# Altium footprint library LimeMicroAltiumLib.PcbLib: 876 footprints (part 21 of 57)
Each footprint in its own frame and in the unit in brackets; x right, y up, seen from the top. Pads: shape width x height; smd on the part's side, far side on the other; paste and mask are expansions set on the pad; w line width, h text height; cw(c..) or ccw(c..) is an arc to the next point about the centre after c.
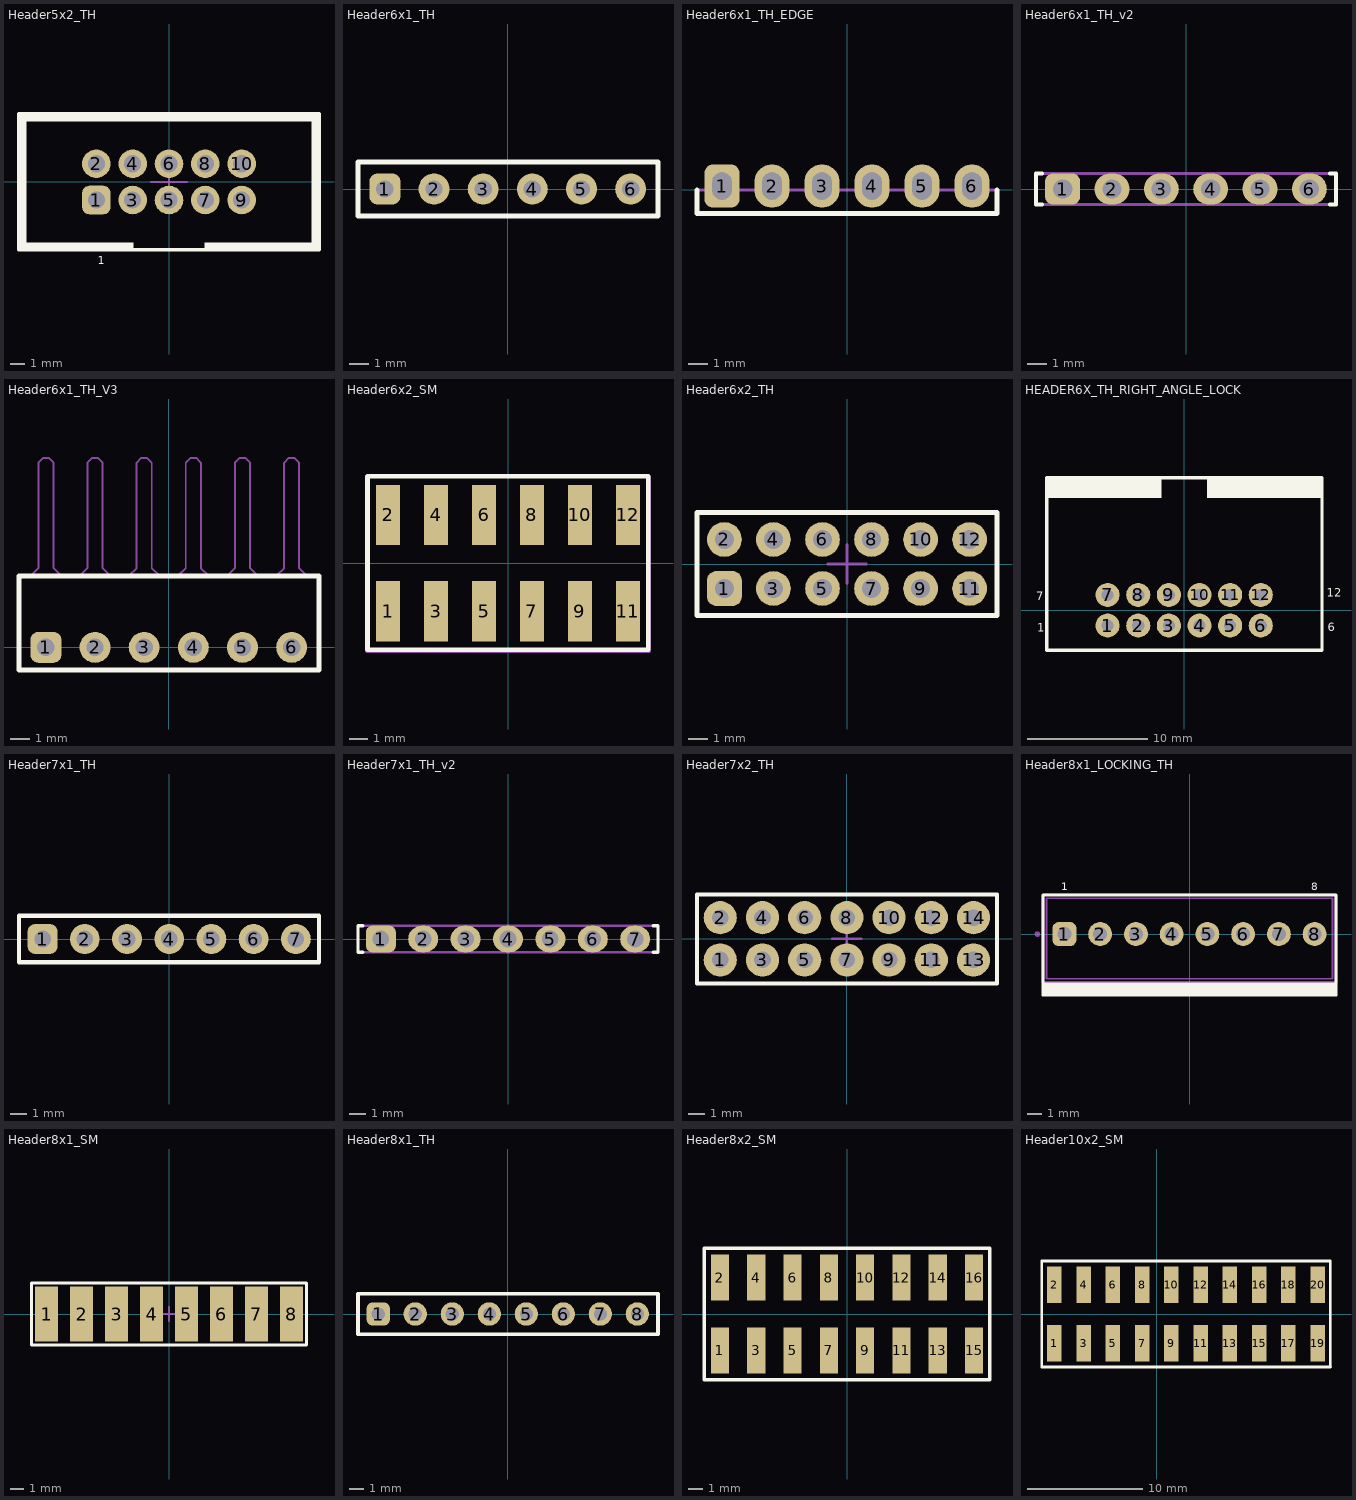
[diagram p20: the footprints below, top view; thin cyan lines are the x and y axes]

## Header5x2_TH [mm]
pads (10):
  rrect50% 2x2 hole 1.2: 1(-5.086,-1.271)
  round 2 hole 1.2: 2(-5.086,1.271) 3(-2.543,-1.271) 4(-2.543,1.271) 5(0,-1.271) 6(0,1.271) 7(2.543,-1.271) 8(2.543,1.271) 9(5.086,-1.271) 10(5.086,1.271)
Top Overlay:
  region: -10.5,-4.75 -10.5,4.75 -10,4.75 -10,-4.75
  region: -10.25,-4.25 -2.5,-4.25 -2.5,-4.75 -10.25,-4.75
  region: 10.25,-4.25 2.5,-4.25 2.5,-4.75 10.25,-4.75
  region: 10.5,-4.75 10.5,4.75 10,4.75 10,-4.75
  region: 10.5,4.25 -10.5,4.25 -10.5,4.75 10.5,4.75
  lines w0.254: -10.5,-4.75 10.5,-4.75 10.5,4.75 -10.5,4.75 -10.5,-4.75
  text "1" at -5,-5.75 h0.55
Mechanical 15:
  lines w0.15: -1.25,0 0,0 ; 0,-1.25 0,0 ; 0,1.25 0,0 ; 1.25,0 0,0 ; -10.5,-4.75 -10.5,4.75 10.5,4.75 10.5,-4.75 -10.5,-4.75
  text ".Designator" at 0,0 h0.55
  text "1" at -5.25,-1.5 h0.55
3D body "702461001.stp": height 9.55, standoff -3.14, extent -10.181,-4.445 10.139,4.445

## Header6x1_TH [mm]
pads (6):
  rrect50% 1.6x1.6 hole 0.9: 1(-6.357,0)
  round 1.6 hole 0.9: 2(-3.814,0) 3(-1.271,0) 4(1.271,0) 5(3.814,0) 6(6.357,0)
Top Overlay:
  lines w0.254: -7.75,-1.4 7.775,-1.4 7.775,1.4 -7.75,1.4 -7.75,-1.4
Mechanical 15:
  lines w0.15: -7.75,-1.4 -7.75,1.4 7.775,1.4 7.775,-1.4 -7.75,-1.4
  text ".Designator" at -1.271,0 h0.55
3D body "65775.stp": height 8.54, standoff -3, extent 5.087,-1.27 7.627,1.27
3D body "65775.stp": height 8.54, standoff -3, extent 2.544,-1.27 5.084,1.27
3D body "65775.stp": height 8.54, standoff -3, extent 0.001,-1.27 2.541,1.27
3D body "65775.stp": height 8.54, standoff -3, extent -2.541,-1.27 -0.001,1.27
3D body "65775.stp": height 8.54, standoff -3, extent -5.084,-1.27 -2.544,1.27
3D body "65775.stp": height 8.54, standoff -3, extent -7.627,-1.27 -5.087,1.27

## Header6x1_TH_EDGE [mm]
pads (6):
  rrect50% 1.8x2.2 hole 1 slot 1.4 at 90 deg: 1(-6.357,0.2)
  oval 1.8x2.2 hole 1 slot 1.4 at 90 deg: 2(-3.814,0.2) 3(-1.271,0.2) 4(1.271,0.2) 5(3.814,0.2) 6(6.357,0.2)
Top Overlay:
  lines w0.254: -7.629,0 -7.629,-1.2 7.629,-1.2 7.629,0
Mechanical 15:
  lines w0.15: -7.629,-1.2 -7.629,0 7.629,0 7.629,-1.2 -7.629,-1.2
  text ".Designator" at 0,0 h0.55

## Header6x1_TH_v2 [mm]
pads (6):
  rrect50% 1.8x1.6 hole 1: 1(-6.357,0)
  oval 1.8x1.6 hole 1: 2(-3.814,0) 3(-1.271,0) 4(1.271,0) 5(3.814,0) 6(6.357,0)
Top Overlay:
  lines w0.2: -7.429,-0.8 -7.729,-0.8 -7.729,0.8 -7.429,0.8 ; 7.429,-0.8 7.729,-0.8 7.729,0.8 7.429,0.8
Mechanical 15:
  lines w0.15: -7.729,-0.8 7.729,-0.8 7.729,0.8 -7.729,0.8 -7.729,-0.8
  text ".Designator" at 0,0 h0.55

## Header6x1_TH_V3 [mm]
pads (6):
  rrect50% 1.6x1.6 hole 0.9: 1(-6.357,0)
  round 1.6 hole 0.9: 2(-3.814,0) 3(-1.271,0) 4(1.271,0) 5(3.814,0) 6(6.357,0)
Top Overlay:
  lines w0.254: -7.75,-1.175 -7.75,3.7 7.775,3.7 7.775,-1.175 -7.75,-1.175
Mechanical 15:
  lines w0.1: -7.15,3.7 -6.75,4.1 -6.75,9.55 -6.5,9.8 -6.214,9.8 -5.964,9.55 -5.964,4.1 -5.564,3.7 ; -4.607,3.7 -4.207,4.1 -4.207,9.55 -3.957,9.8 -3.671,9.8 -3.421,9.55 -3.421,4.1 -3.021,3.7 ; -2.064,3.7 -1.664,4.1 -1.664,9.55 -1.414,9.8 -1.129,9.8 -0.879,9.55 -0.879,4.1 -0.479,3.7 ; 0.479,3.7 0.879,4.1 0.879,9.55 1.129,9.8 1.414,9.8 1.664,9.55 1.664,4.1 2.064,3.7 ; 3.021,3.7 3.421,4.1 3.421,9.55 3.671,9.8 3.957,9.8 4.207,9.55 4.207,4.1 4.607,3.7 ; 5.564,3.7 5.964,4.1 5.964,9.55 6.214,9.8 6.5,9.8 6.75,9.55 6.75,4.1 7.15,3.7
  lines w0.15: -7.75,-1.175 7.775,-1.175 7.775,3.7 -7.75,3.7 -7.75,-1.175
  text ".Designator" at -1.271,0 h0.55
3D body "User Library-Header_Male_RA_Low_1Pin.STEP": height 3.78, standoff -1.73, extent -7.627,-0.32 -5.087,9.81
3D body "User Library-Header_Male_RA_Low_1Pin.STEP": height 3.78, standoff -1.73, extent -5.084,-0.32 -2.544,9.81
3D body "User Library-Header_Male_RA_Low_1Pin.STEP": height 3.78, standoff -1.73, extent -2.541,-0.32 -0.001,9.81
3D body "User Library-Header_Male_RA_Low_1Pin.STEP": height 3.78, standoff -1.73, extent 0.002,-0.32 2.542,9.81
3D body "User Library-Header_Male_RA_Low_1Pin.STEP": height 3.78, standoff -1.73, extent 2.544,-0.32 5.084,9.81
3D body "User Library-Header_Male_RA_Low_1Pin.STEP": height 3.78, standoff -1.73, extent 5.087,-0.32 7.627,9.81

## Header6x2_SM [mm]
pads (12):
  rect 1.27x3.2 smd: 1(-6.357,-2.55) 2(-6.357,2.55) 3(-3.814,-2.55) 4(-3.814,2.55) 5(-1.271,-2.55) 6(-1.271,2.55) 7(1.271,-2.55) 8(1.271,2.55) 9(3.814,-2.55) 10(3.814,2.55) 11(6.357,-2.55) 12(6.357,2.55)
Top Overlay:
  lines w0.254: -7.457,-4.6 -7.457,4.6 7.443,4.6 7.443,-4.6 -7.457,-4.6
Mechanical 15:
  lines w0.15: -7.5,-4.7 7.5,-4.7 7.5,4.6 -7.5,4.6 -7.5,-4.7
  text ".Designator" at 0,0 h0.55
3D body "pin_header_a-sl254-dg-g12mp1.stp": height 9.7, standoff -0.04, extent -7.62,-3.75 7.62,3.75

## Header6x2_TH [mm]
pads (12):
  rrect50% 1.8x1.8 hole 1: 1(-6.357,-1.271)
  round 1.8 hole 1: 2(-6.357,1.271) 3(-3.814,-1.271) 4(-3.814,1.271) 5(-1.271,-1.271) 6(-1.271,1.271) 7(1.271,-1.271) 8(1.271,1.271) 9(3.814,-1.271) 10(3.814,1.271) 11(6.357,-1.271) 12(6.357,1.271)
Top Overlay:
  lines w0.254: -7.779,-2.671 7.779,-2.671 7.779,2.671 -7.779,2.671 -7.779,-2.671
Mechanical 15:
  lines w0.15: -1,0 0,0 ; 0,-1 0,0 ; 0,1 0,0 ; 1,0 0,0 ; -7.779,-2.671 7.779,-2.671 7.779,2.671 -7.779,2.671 -7.779,-2.671
  text ".Designator" at 0,0 h0.55
  text "1" at -6.4,-1.5 h0.55
  text "2" at -6.4,1 h0.55
  text "12" at 6.1,1 h0.55
  text "11" at 6.1,-1.5 h0.55
3D body "65775.stp": height 8.54, standoff -3, extent -7.627,0.002 -5.087,2.542
3D body "65775.stp": height 8.54, standoff -3, extent 5.087,-2.541 7.627,-0.001
3D body "65775.stp": height 8.54, standoff -3, extent 2.544,-2.541 5.084,-0.001
3D body "65775.stp": height 8.54, standoff -3, extent 0.001,-2.541 2.541,-0.001
3D body "65775.stp": height 8.54, standoff -3, extent -2.541,-2.541 -0.001,-0.001
3D body "65775.stp": height 8.54, standoff -3, extent -5.084,-2.541 -2.544,-0.001
3D body "65775.stp": height 8.54, standoff -3, extent -7.627,-2.541 -5.087,-0.001
3D body "65775.stp": height 8.54, standoff -3, extent -5.084,0.002 -2.544,2.542
3D body "65775.stp": height 8.54, standoff -3, extent -2.541,0.002 -0.001,2.542
3D body "65775.stp": height 8.54, standoff -3, extent 0.001,0.002 2.541,2.542
3D body "65775.stp": height 8.54, standoff -3, extent 2.544,0.002 5.084,2.542
3D body "65775.stp": height 8.54, standoff -3, extent 5.087,0.002 7.627,2.542

## HEADER6X_TH_RIGHT_ANGLE_LOCK [mm] "JTAG"
pads (12):
  round 2 hole 1: 1(-6.357,-1.271) 2(-3.814,-1.271) 3(-1.271,-1.271) 4(1.271,-1.271) 5(3.814,-1.271) 6(6.357,-1.271) 7(-6.357,1.271) 8(-3.814,1.271) 9(-1.271,1.271) 10(1.271,1.271) 11(3.814,1.271) 12(6.357,1.271)
Top Overlay:
  region: 11.436,11 11.436,9.325 1.929,9.325 1.929,11
  region: -11.407,11 -11.407,9.325 -1.9,9.325 -1.9,11
  lines w0.254: -11.407,-3.321 11.436,-3.321 11.436,11 -11.407,11 -11.407,-3.321
  text "7" at -12.3,0.85 h0.7
  text "12" at 11.85,1.125 h0.7
  text "6" at 11.9,-1.75 h0.7
  text "1" at -12.2,-1.775 h0.7
Mechanical 15:
  lines w0.15: -11.407,-3.321 -11.407,11 11.436,11 11.436,-3.321 -11.407,-3.321
  text "12" at 5.8,0.9 h0.7
  text "1" at -6.5,-1.75 h0.7
  text ".Designator" at 0.1,0.025 h0.55
  text "PCB edge" at -2.225,9.65 h0.55
3D body "HTST-106-04-L-D-RA.step": height 9.45, standoff -3.13, extent -11.43,-1.571 11.43,11.065

## Header7x1_TH [mm]
pads (7):
  rrect50% 1.8x1.8 hole 1: 1(-7.629,0)
  round 1.8 hole 1: 2(-5.086,0) 3(-2.543,0) 4(0,0) 5(2.543,0) 6(5.086,0) 7(7.629,0)
Top Overlay:
  lines w0.254: -9.05,-1.4 -9.05,1.4 9.025,1.4 9.025,-1.4 -9.05,-1.4
Mechanical 15:
  lines w0.15: -9.05,-1.4 9.025,-1.4 9.025,1.4 -9.05,1.4 -9.05,-1.4
  text ".Designator" at 0,0 h0.55
3D body "65775.stp": height 8.54, standoff -3, extent 6.359,-1.27 8.899,1.27
3D body "65775.stp": height 8.54, standoff -3, extent 3.816,-1.27 6.356,1.27
3D body "65775.stp": height 8.54, standoff -3, extent 1.273,-1.27 3.813,1.27
3D body "65775.stp": height 8.54, standoff -3, extent -1.27,-1.27 1.27,1.27
3D body "65775.stp": height 8.54, standoff -3, extent -3.813,-1.27 -1.273,1.27
3D body "65775.stp": height 8.54, standoff -3, extent -6.356,-1.27 -3.816,1.27
3D body "65775.stp": height 8.54, standoff -3, extent -8.899,-1.27 -6.359,1.27

## Header7x1_TH_v2 [mm]
pads (7):
  rrect50% 1.8x1.6 hole 1: 1(-7.629,0)
  oval 1.8x1.6 hole 1: 2(-5.086,0) 3(-2.543,0) 4(0,0) 5(2.543,0) 6(5.086,0) 7(7.629,0)
Top Overlay:
  lines w0.2: -8.7,-0.8 -9,-0.8 -9,0.8 -8.7,0.8 ; 8.7,-0.8 9,-0.8 9,0.8 8.7,0.8
Mechanical 15:
  lines w0.15: -9,-0.8 -9,0.8 9,0.8 9,-0.8 -9,-0.8
  text ".Designator" at 0,0 h0.55

## Header7x2_TH [mm] "JTAG"
pads (14):
  round 2 hole 1: 1(-7.629,-1.271) 2(-7.629,1.271) 3(-5.086,-1.271) 4(-5.086,1.271) 5(-2.543,-1.271) 6(-2.543,1.271) 7(0,-1.271) 8(0,1.271) 9(2.543,-1.271) 10(2.543,1.271) 11(5.086,-1.271) 12(5.086,1.271) 13(7.629,-1.271) 14(7.629,1.271)
Top Overlay:
  lines w0.254: -9.029,-2.7 -9.029,2.675 9.043,2.675 9.043,-2.7 -9.029,-2.7
Mechanical 15:
  lines w0.15: -0.875,0 0,0 ; 0,-0.875 0,0 ; 0,0.875 0,0 ; 0.875,0 0,0 ; -9.029,-2.7 9.043,-2.7 9.043,2.675 -9.029,2.675 -9.029,-2.7
  text "1" at -7.775,-1.55 h0.6
  text ".Designator" at 0,0 h0.55
3D body "65775.stp": height 8.54, standoff -3, extent 6.359,0.002 8.899,2.542
3D body "65775.stp": height 8.54, standoff -3, extent 6.359,-2.541 8.899,-0.001
3D body "65775.stp": height 8.54, standoff -3, extent -1.27,0.002 1.27,2.542
3D body "65775.stp": height 8.54, standoff -3, extent -1.27,-2.541 1.27,-0.001
3D body "65775.stp": height 8.54, standoff -3, extent 1.273,-2.541 3.813,-0.001
3D body "65775.stp": height 8.54, standoff -3, extent 1.273,0.002 3.813,2.542
3D body "65775.stp": height 8.54, standoff -3, extent 3.816,-2.541 6.356,-0.001
3D body "65775.stp": height 8.54, standoff -3, extent 3.816,0.002 6.356,2.542
3D body "65775.stp": height 8.54, standoff -3, extent -3.813,0.002 -1.273,2.542
3D body "65775.stp": height 8.54, standoff -3, extent -3.813,-2.541 -1.273,-0.001
3D body "65775.stp": height 8.54, standoff -3, extent -6.356,0.002 -3.816,2.542
3D body "65775.stp": height 8.54, standoff -3, extent -6.356,-2.541 -3.816,-0.001
3D body "65775.stp": height 8.54, standoff -3, extent -8.899,-2.541 -6.359,-0.001
3D body "65775.stp": height 8.54, standoff -3, extent -8.899,0.002 -6.359,2.542

## Header8x1_LOCKING_TH [mm]
pads (8):
  rrect50% 1.7x1.7 hole 1: 1(-8.89,0)
  round 1.7 hole 1: 2(-6.35,0) 3(-3.81,0) 4(-1.27,0) 5(1.27,0) 6(3.81,0) 7(6.35,0) 8(8.89,0)
Top Overlay:
  region: -10.415,-3.45 -10.415,-4.35 10.41,-4.35 10.41,-3.45
  lines w0.2: -10.415,-4.35 -10.415,2.775 10.41,2.775 10.41,-4.35 -10.415,-4.35
  text "8" at 8.665,3.1 h0.55
  text "1" at -9.115,3.1 h0.55
Mechanical 13:
  circle w0.2: c-10.81,0 r0.1
  lines w0.127: -10.16,-3.18 10.16,-3.18 ; -10.16,-3.18 -10.16,2.54 ; -10.16,-3.18 10.16,-3.18 ; -10.16,-3.18 -10.16,2.54 ; -10.16,2.54 10.16,2.54 ; 10.16,-3.18 10.16,2.54 ; 10.16,-3.18 10.16,2.54
Mechanical 15:
  lines w0.2: -10.41,-3.43 10.41,-3.43 10.41,2.79 -10.41,2.79 -10.41,-3.43
  text "1" at -8.94,-0.25 h0.55
  text ".Designator" at 0.16,-0.05 h0.55
3D body "step_temp.STEP": height 10.03, standoff -3.94, extent -10.16,-3.175 10.16,2.54

## Header8x1_SM [mm]
pads (8):
  rect 1.7x4 smd: 1(-8.9,0) 2(-6.357,0) 3(-3.814,0) 4(-1.271,0) 5(1.271,0) 6(3.814,0) 7(6.357,0) 8(8.9,0)
Top Overlay:
  lines w0.2: -10,-2.25 10,-2.25 10,2.25 -10,2.25 -10,-2.25
Mechanical 15:
  lines w0.15: -0.5,0 0,0 ; 0,-0.5 0,0 ; 0,0.5 0,0 ; 0.5,0 0,0 ; -10.014,-2.25 -10.014,2.25 10,2.25 10,-2.25 -10.014,-2.25
  text ".Designator" at 0,0 h0.55

## Header8x1_TH [mm]
pads (8):
  rrect50% 1.6x1.6 hole 0.9: 1(-8.9,0)
  round 1.6 hole 0.9: 2(-6.357,0) 3(-3.814,0) 4(-1.271,0) 5(1.271,0) 6(3.814,0) 7(6.357,0) 8(8.9,0)
Top Overlay:
  lines w0.254: -10.293,-1.4 -10.293,1.4 10.318,1.4 10.318,-1.4 -10.293,-1.4
Mechanical 15:
  lines w0.15: -10.293,-1.4 10.318,-1.4 10.318,1.4 -10.293,1.4 -10.293,-1.4
  text "1" at -9.1,-0.2 h0.55
  text ".Designator" at 0,0 h0.55
3D body "65775.stp": height 8.54, standoff -3, extent 7.63,-1.27 10.17,1.27
3D body "65775.stp": height 8.54, standoff -3, extent 5.087,-1.27 7.627,1.27
3D body "65775.stp": height 8.54, standoff -3, extent -10.17,-1.27 -7.63,1.27
3D body "65775.stp": height 8.54, standoff -3, extent -7.627,-1.27 -5.087,1.27
3D body "65775.stp": height 8.54, standoff -3, extent -5.084,-1.27 -2.544,1.27
3D body "65775.stp": height 8.54, standoff -3, extent -2.541,-1.27 -0.001,1.27
3D body "65775.stp": height 8.54, standoff -3, extent 0.001,-1.27 2.541,1.27
3D body "65775.stp": height 8.54, standoff -3, extent 2.544,-1.27 5.084,1.27

## Header8x2_SM [mm]
pads (16):
  rect 1.27x3.2 smd: 1(-8.9,-2.55) 2(-8.9,2.55) 3(-6.357,-2.55) 4(-6.357,2.55) 5(-3.814,-2.55) 6(-3.814,2.55) 7(-1.271,-2.55) 8(-1.271,2.55) 9(1.271,-2.55) 10(1.271,2.55) 11(3.814,-2.55) 12(3.814,2.55) 13(6.357,-2.55) 14(6.357,2.55) 15(8.9,-2.55) 16(8.9,2.55)
Top Overlay:
  lines w0.254: -10,-4.6 -10,4.6 10,4.6 10,-4.6 -10,-4.6
Mechanical 15:
  lines w0.15: -10,-4.6 10,-4.6 10,4.6 -10,4.6 -10,-4.6
  text ".Designator" at 0,0 h0.55
3D body "pin_header_a-sl254-dg-g08mp1.stp": height 9.7, standoff -0.04, extent -0.02,-3.95 10.14,3.55
3D body "pin_header_a-sl254-dg-g08mp1.stp": height 9.7, standoff -0.04, extent -10.18,-3.95 -0.02,3.55

## Header10x2_SM [mm] "JTAG"
pads (20):
  rect 1.27x3.2 smd: 1(-8.9,-2.55) 2(-8.9,2.55) 3(-6.357,-2.55) 4(-6.357,2.55) 5(-3.814,-2.55) 6(-3.814,2.55) 7(-1.271,-2.55) 8(-1.271,2.55) 9(1.271,-2.55) 10(1.271,2.55) 11(3.814,-2.55) 12(3.814,2.55) 13(6.357,-2.55) 14(6.357,2.55) 15(8.9,-2.55) 16(8.9,2.55) 17(11.443,-2.55) 18(11.443,2.55) 19(13.986,-2.55) 20(13.986,2.55)
Top Overlay:
  lines w0.254: 15.086,-4.6 15.086,4.6 -10,4.6 -10,-4.6 15.1,-4.6
Mechanical 15:
  lines w0.15: -10,-4.6 -10,4.6 15.1,4.6 15.1,-4.6 -10,-4.6
  text ".Designator" at 0,0 h0.55
3D body "pin_header_a-sl254-dg-g20mp1.stp": height 9.7, standoff -0.04, extent -10.2,-3.75 15.2,3.75